# Altium footprint library Raspberry_PI_Pico.PcbLib: 3 footprints
Each footprint in its own frame and in the unit in brackets; x right, y up, seen from the top. Pads: shape width x height; smd on the part's side, far side on the other; paste and mask are expansions set on the pad; w line width, h text height; cw(c..) or ccw(c..) is an arc to the next point about the centre after c.
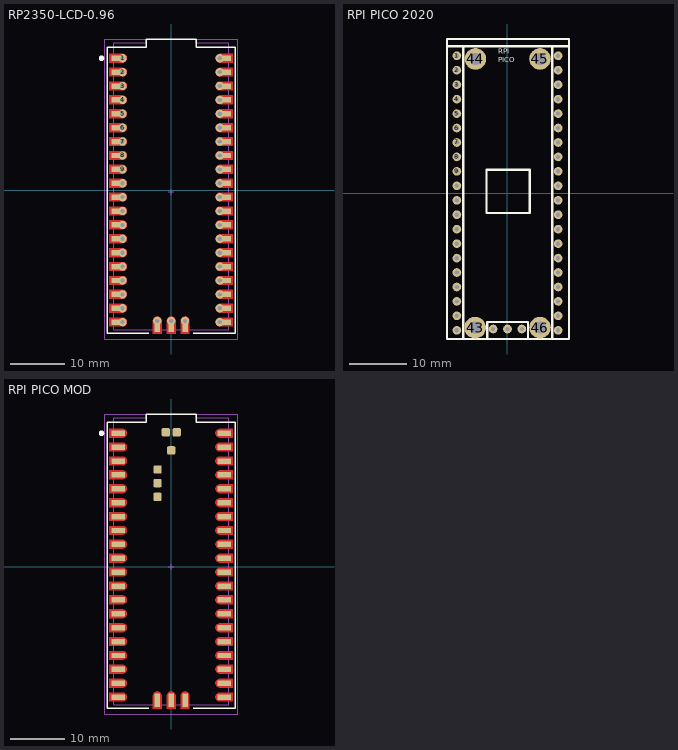
[diagram p0: the footprints below, top view; thin cyan lines are the x and y axes]

## RP2350-LCD-0.96 [mm] "Waveshare RP2350-LCD-0.96"
height 1
pads (86):
  rect 2.5x1 smd mask+0.102: 1(-9.69,24.13) 2(-9.69,21.59) 4(-9.69,16.51) 5(-9.69,13.97) 6(-9.69,11.43) 7(-9.69,8.89) 8(-9.69,6.35) 9(-9.69,3.81) 10(-9.69,1.27) 11(-9.69,-1.27) 12(-9.69,-3.81) 13(-9.69,-6.35) 14(-9.69,-8.89) 15(-9.69,-11.43) 16(-9.69,-13.97) 17(-9.69,-16.51) 18(-9.69,-19.05) 19(-9.69,-21.59) 20(-9.69,-24.13)
  round 1.524 hole 0.762: 1(-8.89,24.13) 2(-8.89,21.59) 3(-8.89,19.05) 4(-8.89,16.51) 5(-8.89,13.97) 6(-8.89,11.43) 7(-8.89,8.89) 8(-8.89,6.35) 9(-8.89,3.81) 10(-8.89,1.27) 11(-8.89,-1.27) 12(-8.89,-3.81) 13(-8.89,-6.35) 14(-8.89,-8.89) 15(-8.89,-11.43) 16(-8.89,-13.97) 17(-8.89,-16.51) 18(-8.89,-19.05) 19(-8.89,-21.59) 20(-8.89,-24.13) 21(8.89,-24.13) 22(8.89,-21.59) 23(8.89,-19.05) 24(8.89,-16.51) 25(8.89,-13.97) 26(8.89,-11.43) 27(8.89,-8.89) 28(8.89,-6.35) 29(8.89,-3.81) 30(8.89,-1.27) 31(8.89,1.27) 32(8.89,3.81) 33(8.89,6.35) 34(8.89,8.89) 35(8.89,11.43) 36(8.89,13.97) 37(8.89,16.51) 38(8.89,19.05) 39(8.89,21.59) 40(8.89,24.13) 41(-2.54,-23.9) 42(0,-23.9) 43(2.54,-23.9)
  rrect25% 2.5x1 smd mask+0.102: 3(-9.69,19.05)
  rect 2.5x1 smd: 21(9.69,-24.13) 22(9.69,-21.59) 23(9.69,-19.05) 24(9.69,-16.51) 25(9.69,-13.97) 26(9.69,-11.43) 27(9.69,-8.89) 28(9.69,-6.35) 29(9.69,-3.81) 30(9.69,-1.27) 31(9.69,1.27) 32(9.69,3.81) 33(9.69,6.35) 34(9.69,8.89) 35(9.69,11.43) 36(9.69,13.97) 37(9.69,16.51) 38(9.69,19.05) 39(9.69,21.59) 40(9.69,24.13)
  rect 1x2.5 smd: 41(-2.54,-24.7) 42(0,-24.7) 43(2.54,-24.7)
Top Layer:
  region: -1.74,-26.284 -3.34,-26.284 -3.34,-23.884 -3.34,-23.779 -3.285,-23.575 -3.18,-23.393 -3.031,-23.244 -2.849,-23.139 -2.645,-23.084 -2.435,-23.084 -2.231,-23.139 -2.049,-23.244 -1.9,-23.393 -1.795,-23.575 -1.74,-23.779 -1.74,-23.884
  region: 0.8,-26.284 -0.8,-26.284 -0.8,-23.884 -0.8,-23.779 -0.745,-23.575 -0.64,-23.393 -0.491,-23.244 -0.309,-23.139 -0.105,-23.084 0.105,-23.084 0.309,-23.139 0.491,-23.244 0.64,-23.393 0.745,-23.575 0.8,-23.779 0.8,-23.884
  region: 3.34,-26.284 1.74,-26.284 1.74,-23.884 1.74,-23.779 1.795,-23.575 1.9,-23.393 2.049,-23.244 2.231,-23.139 2.435,-23.084 2.645,-23.084 2.849,-23.139 3.031,-23.244 3.18,-23.393 3.285,-23.575 3.34,-23.779 3.34,-23.884
  region: -11.292,-24.914 -11.292,-23.314 -8.892,-23.314 -8.787,-23.314 -8.583,-23.369 -8.401,-23.474 -8.252,-23.623 -8.147,-23.805 -8.092,-24.009 -8.092,-24.219 -8.147,-24.423 -8.252,-24.605 -8.401,-24.754 -8.583,-24.859 -8.787,-24.914 -8.892,-24.914
  region: -11.292,-22.374 -11.292,-20.774 -8.892,-20.774 -8.787,-20.774 -8.583,-20.829 -8.401,-20.934 -8.252,-21.083 -8.147,-21.265 -8.092,-21.469 -8.092,-21.679 -8.147,-21.883 -8.252,-22.065 -8.401,-22.214 -8.583,-22.319 -8.787,-22.374 -8.892,-22.374
  region: -11.292,-19.834 -11.292,-18.234 -8.892,-18.234 -8.787,-18.234 -8.583,-18.289 -8.401,-18.394 -8.252,-18.543 -8.147,-18.725 -8.092,-18.929 -8.092,-19.139 -8.147,-19.343 -8.252,-19.525 -8.401,-19.674 -8.583,-19.779 -8.787,-19.834 -8.892,-19.834
  region: -11.292,-17.294 -11.292,-15.694 -8.892,-15.694 -8.787,-15.694 -8.583,-15.749 -8.401,-15.854 -8.252,-16.003 -8.147,-16.185 -8.092,-16.389 -8.092,-16.599 -8.147,-16.803 -8.252,-16.985 -8.401,-17.134 -8.583,-17.239 -8.787,-17.294 -8.892,-17.294
  region: -11.292,-14.754 -11.292,-13.154 -8.892,-13.154 -8.787,-13.154 -8.583,-13.209 -8.401,-13.314 -8.252,-13.463 -8.147,-13.645 -8.092,-13.849 -8.092,-14.059 -8.147,-14.263 -8.252,-14.445 -8.401,-14.594 -8.583,-14.699 -8.787,-14.754 -8.892,-14.754
  region: -11.292,-12.214 -11.292,-10.614 -8.892,-10.614 -8.787,-10.614 -8.583,-10.669 -8.401,-10.774 -8.252,-10.923 -8.147,-11.105 -8.092,-11.309 -8.092,-11.519 -8.147,-11.723 -8.252,-11.905 -8.401,-12.054 -8.583,-12.159 -8.787,-12.214 -8.892,-12.214
  region: -11.292,-9.674 -11.292,-8.074 -8.892,-8.074 -8.787,-8.074 -8.583,-8.129 -8.401,-8.234 -8.252,-8.383 -8.147,-8.565 -8.092,-8.769 -8.092,-8.979 -8.147,-9.183 -8.252,-9.365 -8.401,-9.514 -8.583,-9.619 -8.787,-9.674 -8.892,-9.674
  region: -11.292,-7.134 -11.292,-5.534 -8.892,-5.534 -8.787,-5.534 -8.583,-5.589 -8.401,-5.694 -8.252,-5.843 -8.147,-6.025 -8.092,-6.229 -8.092,-6.439 -8.147,-6.643 -8.252,-6.825 -8.401,-6.974 -8.583,-7.079 -8.787,-7.134 -8.892,-7.134
  region: -11.292,-4.594 -11.292,-2.994 -8.892,-2.994 -8.787,-2.994 -8.583,-3.049 -8.401,-3.154 -8.252,-3.303 -8.147,-3.485 -8.092,-3.689 -8.092,-3.899 -8.147,-4.103 -8.252,-4.285 -8.401,-4.434 -8.583,-4.539 -8.787,-4.594 -8.892,-4.594
  region: -11.292,-2.054 -11.292,-0.454 -8.892,-0.454 -8.787,-0.454 -8.583,-0.509 -8.401,-0.614 -8.252,-0.763 -8.147,-0.945 -8.092,-1.149 -8.092,-1.359 -8.147,-1.563 -8.252,-1.745 -8.401,-1.894 -8.583,-1.999 -8.787,-2.054 -8.892,-2.054
  region: -11.292,0.486 -11.292,2.086 -8.892,2.086 -8.787,2.086 -8.583,2.031 -8.401,1.926 -8.252,1.777 -8.147,1.595 -8.092,1.391 -8.092,1.181 -8.147,0.977 -8.252,0.795 -8.401,0.646 -8.583,0.541 -8.787,0.486 -8.892,0.486
  region: -11.292,3.026 -11.292,4.626 -8.892,4.626 -8.787,4.626 -8.583,4.571 -8.401,4.466 -8.252,4.317 -8.147,4.135 -8.092,3.931 -8.092,3.721 -8.147,3.517 -8.252,3.335 -8.401,3.186 -8.583,3.081 -8.787,3.026 -8.892,3.026
  region: -11.292,5.566 -11.292,7.166 -8.892,7.166 -8.787,7.166 -8.583,7.111 -8.401,7.006 -8.252,6.857 -8.147,6.675 -8.092,6.471 -8.092,6.261 -8.147,6.057 -8.252,5.875 -8.401,5.726 -8.583,5.621 -8.787,5.566 -8.892,5.566
  region: -11.292,8.106 -11.292,9.706 -8.892,9.706 -8.787,9.706 -8.583,9.651 -8.401,9.546 -8.252,9.397 -8.147,9.215 -8.092,9.011 -8.092,8.801 -8.147,8.597 -8.252,8.415 -8.401,8.266 -8.583,8.161 -8.787,8.106 -8.892,8.106
  region: -11.292,10.646 -11.292,12.246 -8.892,12.246 -8.787,12.246 -8.583,12.191 -8.401,12.086 -8.252,11.937 -8.147,11.755 -8.092,11.551 -8.092,11.341 -8.147,11.137 -8.252,10.955 -8.401,10.806 -8.583,10.701 -8.787,10.646 -8.892,10.646
  region: -11.292,13.186 -11.292,14.786 -8.892,14.786 -8.787,14.786 -8.583,14.731 -8.401,14.626 -8.252,14.477 -8.147,14.295 -8.092,14.091 -8.092,13.881 -8.147,13.677 -8.252,13.495 -8.401,13.346 -8.583,13.241 -8.787,13.186 -8.892,13.186
  region: -11.292,15.726 -11.292,17.326 -8.892,17.326 -8.787,17.326 -8.583,17.271 -8.401,17.166 -8.252,17.017 -8.147,16.835 -8.092,16.631 -8.092,16.421 -8.147,16.217 -8.252,16.035 -8.401,15.886 -8.583,15.781 -8.787,15.726 -8.892,15.726
  region: -11.292,18.266 -11.292,19.866 -8.892,19.866 -8.787,19.866 -8.583,19.811 -8.401,19.706 -8.252,19.557 -8.147,19.375 -8.092,19.171 -8.092,18.961 -8.147,18.757 -8.252,18.575 -8.401,18.426 -8.583,18.321 -8.787,18.266 -8.892,18.266
  region: -11.292,20.806 -11.292,22.406 -8.892,22.406 -8.787,22.406 -8.583,22.351 -8.401,22.246 -8.252,22.097 -8.147,21.915 -8.092,21.711 -8.092,21.501 -8.147,21.297 -8.252,21.115 -8.401,20.966 -8.583,20.861 -8.787,20.806 -8.892,20.806
  region: -11.292,23.346 -11.292,24.946 -8.892,24.946 -8.787,24.946 -8.583,24.891 -8.401,24.786 -8.252,24.637 -8.147,24.455 -8.092,24.251 -8.092,24.041 -8.147,23.837 -8.252,23.655 -8.401,23.506 -8.583,23.401 -8.787,23.346 -8.892,23.346
  region: 11.292,23.346 11.292,24.946 8.892,24.946 8.787,24.946 8.583,24.891 8.401,24.786 8.252,24.637 8.147,24.455 8.092,24.251 8.092,24.041 8.147,23.837 8.252,23.655 8.401,23.506 8.583,23.401 8.787,23.346 8.892,23.346
  region: 11.292,20.806 11.292,22.406 8.892,22.406 8.787,22.406 8.583,22.351 8.401,22.246 8.252,22.097 8.147,21.915 8.092,21.711 8.092,21.501 8.147,21.297 8.252,21.115 8.401,20.966 8.583,20.861 8.787,20.806 8.892,20.806
  region: 11.292,18.266 11.292,19.866 8.892,19.866 8.787,19.866 8.583,19.811 8.401,19.706 8.252,19.557 8.147,19.375 8.092,19.171 8.092,18.961 8.147,18.757 8.252,18.575 8.401,18.426 8.583,18.321 8.787,18.266 8.892,18.266
  region: 11.292,15.726 11.292,17.326 8.892,17.326 8.787,17.326 8.583,17.271 8.401,17.166 8.252,17.017 8.147,16.835 8.092,16.631 8.092,16.421 8.147,16.217 8.252,16.035 8.401,15.886 8.583,15.781 8.787,15.726 8.892,15.726
  region: 11.292,13.186 11.292,14.786 8.892,14.786 8.787,14.786 8.583,14.731 8.401,14.626 8.252,14.477 8.147,14.295 8.092,14.091 8.092,13.881 8.147,13.677 8.252,13.495 8.401,13.346 8.583,13.241 8.787,13.186 8.892,13.186
  region: 11.292,10.646 11.292,12.246 8.892,12.246 8.787,12.246 8.583,12.191 8.401,12.086 8.252,11.937 8.147,11.755 8.092,11.551 8.092,11.341 8.147,11.137 8.252,10.955 8.401,10.806 8.583,10.701 8.787,10.646 8.892,10.646
  region: 11.292,8.106 11.292,9.706 8.892,9.706 8.787,9.706 8.583,9.651 8.401,9.546 8.252,9.397 8.147,9.215 8.092,9.011 8.092,8.801 8.147,8.597 8.252,8.415 8.401,8.266 8.583,8.161 8.787,8.106 8.892,8.106
  region: 11.292,5.566 11.292,7.166 8.892,7.166 8.787,7.166 8.583,7.111 8.401,7.006 8.252,6.857 8.147,6.675 8.092,6.471 8.092,6.261 8.147,6.057 8.252,5.875 8.401,5.726 8.583,5.621 8.787,5.566 8.892,5.566
  region: 11.292,3.026 11.292,4.626 8.892,4.626 8.787,4.626 8.583,4.571 8.401,4.466 8.252,4.317 8.147,4.135 8.092,3.931 8.092,3.721 8.147,3.517 8.252,3.335 8.401,3.186 8.583,3.081 8.787,3.026 8.892,3.026
  region: 11.292,0.486 11.292,2.086 8.892,2.086 8.787,2.086 8.583,2.031 8.401,1.926 8.252,1.777 8.147,1.595 8.092,1.391 8.092,1.181 8.147,0.977 8.252,0.795 8.401,0.646 8.583,0.541 8.787,0.486 8.892,0.486
  region: 11.292,-2.054 11.292,-0.454 8.892,-0.454 8.787,-0.454 8.583,-0.509 8.401,-0.614 8.252,-0.763 8.147,-0.945 8.092,-1.149 8.092,-1.359 8.147,-1.563 8.252,-1.745 8.401,-1.894 8.583,-1.999 8.787,-2.054 8.892,-2.054
  region: 11.292,-4.594 11.292,-2.994 8.892,-2.994 8.787,-2.994 8.583,-3.049 8.401,-3.154 8.252,-3.303 8.147,-3.485 8.092,-3.689 8.092,-3.899 8.147,-4.103 8.252,-4.285 8.401,-4.434 8.583,-4.539 8.787,-4.594 8.892,-4.594
  region: 11.292,-7.134 11.292,-5.534 8.892,-5.534 8.787,-5.534 8.583,-5.589 8.401,-5.694 8.252,-5.843 8.147,-6.025 8.092,-6.229 8.092,-6.439 8.147,-6.643 8.252,-6.825 8.401,-6.974 8.583,-7.079 8.787,-7.134 8.892,-7.134
  region: 11.292,-9.674 11.292,-8.074 8.892,-8.074 8.787,-8.074 8.583,-8.129 8.401,-8.234 8.252,-8.383 8.147,-8.565 8.092,-8.769 8.092,-8.979 8.147,-9.183 8.252,-9.365 8.401,-9.514 8.583,-9.619 8.787,-9.674 8.892,-9.674
  region: 11.292,-12.214 11.292,-10.614 8.892,-10.614 8.787,-10.614 8.583,-10.669 8.401,-10.774 8.252,-10.923 8.147,-11.105 8.092,-11.309 8.092,-11.519 8.147,-11.723 8.252,-11.905 8.401,-12.054 8.583,-12.159 8.787,-12.214 8.892,-12.214
  region: 11.292,-14.754 11.292,-13.154 8.892,-13.154 8.787,-13.154 8.583,-13.209 8.401,-13.314 8.252,-13.463 8.147,-13.645 8.092,-13.849 8.092,-14.059 8.147,-14.263 8.252,-14.445 8.401,-14.594 8.583,-14.699 8.787,-14.754 8.892,-14.754
  region: 11.292,-17.294 11.292,-15.694 8.892,-15.694 8.787,-15.694 8.583,-15.749 8.401,-15.854 8.252,-16.003 8.147,-16.185 8.092,-16.389 8.092,-16.599 8.147,-16.803 8.252,-16.985 8.401,-17.134 8.583,-17.239 8.787,-17.294 8.892,-17.294
  region: 11.292,-19.834 11.292,-18.234 8.892,-18.234 8.787,-18.234 8.583,-18.289 8.401,-18.394 8.252,-18.543 8.147,-18.725 8.092,-18.929 8.092,-19.139 8.147,-19.343 8.252,-19.525 8.401,-19.674 8.583,-19.779 8.787,-19.834 8.892,-19.834
  region: 11.292,-22.374 11.292,-20.774 8.892,-20.774 8.787,-20.774 8.583,-20.829 8.401,-20.934 8.252,-21.083 8.147,-21.265 8.092,-21.469 8.092,-21.679 8.147,-21.883 8.252,-22.065 8.401,-22.214 8.583,-22.319 8.787,-22.374 8.892,-22.374
  region: 11.292,-24.914 11.292,-23.314 8.892,-23.314 8.787,-23.314 8.583,-23.369 8.401,-23.474 8.252,-23.623 8.147,-23.805 8.092,-24.009 8.092,-24.219 8.147,-24.423 8.252,-24.605 8.401,-24.754 8.583,-24.859 8.787,-24.914 8.892,-24.914
  lines w0.254: -10.16,1.074 -9.886,1.074 -9.69,1.27
Top Overlay:
  circle w0.508: c-12.738,24.13 r0.254
  lines w0.254: -4.102,-26.162 -11.684,-26.162 -11.684,26.131 -4.572,26.131 -4.572,27.655 4.572,27.655 4.572,26.131 11.684,26.131 11.684,-26.162 4.026,-26.162
Mechanical 13:
  lines w0.1: -10.49,-25.493 -10.49,26.933 -4.572,26.933 -4.572,27.655 -3.048,27.655 4.572,27.655 4.572,26.933 10.51,26.933 10.51,-25.493 -10.49,-25.493
Mechanical 15:
  lines w0.05: -0.5,-0.285 0.5,-0.285 ; 0,-0.785 0,0.215 ; -12.192,-27.209 -12.192,27.655 12.192,27.655 12.192,-27.209 -12.192,-27.209
3D body "RP2350_LCD_0.96_STEP.step": height 6.2, standoff 0.94, extent -10.499,-25.493 10.518,26.926
3D body "TSW-120-23-G-S-LL.stp": height 8.38, standoff -2.92, extent -10.16,-25.527 -7.62,25.4
3D body "TSW-120-23-G-S-LL.stp": height 8.38, standoff -2.92, extent 7.62,-25.527 10.16,25.4

## RPI PICO 2020 [mil]
pads (47):
  round 60 hole 30: 1(-350,950) 2(-350,850) 3(-350,750) 4(-350,650) 5(-350,550) 6(-350,450) 7(-350,350) 8(-350,250) 9(-350,150) 10(-350,50) 11(-350,-50) 12(-350,-150) 13(-350,-250) 14(-350,-350) 15(-350,-450) 16(-350,-550) 17(-350,-650) 18(-350,-750) 19(-350,-850) 20(-350,-950) 21(350,-950) 22(350,-850) 23(350,-750) 24(350,-650) 25(350,-550) 26(350,-450) 27(350,-350) 28(350,-250) 29(350,-150) 30(350,-50) 31(350,50) 32(350,150) 33(350,250) 34(350,350) 35(350,450) 36(350,550) 37(350,650) 38(350,750) 39(350,850) 40(350,950) 41(-100,-940.94) 42(0,-940.94) 43(100,-940.94)
  round 149.61 hole 82.68 mask+4: 43(-224,-931.26) 44(-222,928) 46(224.82,-931)
  round 149.61 hole 82.68: 45(224.82,928)
Top Overlay:
  lines w16: -416,1016.06 -130,1016.06 421,1016.06 cw(c421,1012.06) 425,1012.06 ; -306,-1007.26 -306,1012.06 ; -141,-1008.94 -141,-891.94 142,-891.94 142,-1009.94 ; 309,-1009.26 309,1014.06 ; -419,-1009.94 -419,1050 -419,1066.06 426,1066.06 426,1050 426,-1009.94 -419,-1009.94 ; -145,-137.94 -145,162.06 155,162.06 155,-137.94 -145,-137.94
  text "RPI / PICO" at -65.69,889.74 h60
Mechanical 1:
  text "PCB EDGE FOR USB" at -170.07,1029.74 h30
3D body "RASPBERRY PI PICO.STEP": height 246.85, standoff 100, extent -413.38,-1003.93 413.39,1055.12
3D body "TSW-120-23-G-S-LL.stp": height 330, standoff -115, extent 300,-1004.99 400,1000.01
3D body "TSW-120-23-G-S-LL.stp": height 330, standoff -115, extent -400,-1004.99 -300,1000.01

## RPI PICO MOD [mm] "RASPBERRY PI PICO RP2040 BOARD"
height 1
pads (49):
  rect 2.5x1 smd mask+0.102: 1(-9.69,24.415) 2(-9.69,21.875) 4(-9.69,16.795) 5(-9.69,14.255) 6(-9.69,11.715) 7(-9.69,9.175) 8(-9.69,6.635) 9(-9.69,4.095) 10(-9.69,1.555) 11(-9.69,-0.985) 12(-9.69,-3.525) 13(-9.69,-6.065) 14(-9.69,-8.605) 15(-9.69,-11.145) 16(-9.69,-13.685) 17(-9.69,-16.225) 18(-9.69,-18.765) 19(-9.69,-21.305) 20(-9.69,-23.845)
  rrect25% 2.5x1 smd mask+0.102: 3(-9.69,19.335)
  rect 2.5x1 smd: 21(9.69,-23.845) 22(9.69,-21.305) 23(9.69,-18.765) 24(9.69,-16.225) 25(9.69,-13.685) 26(9.69,-11.145) 27(9.69,-8.605) 28(9.69,-6.065) 29(9.69,-3.525) 30(9.69,-0.985) 31(9.69,1.555) 32(9.69,4.095) 33(9.69,6.635) 34(9.69,9.175) 35(9.69,11.715) 36(9.69,14.255) 37(9.69,16.795) 38(9.69,19.335) 39(9.69,21.875) 40(9.69,24.415)
  rect 1x2.5 smd: 41(-2.54,-24.415) 42(0,-24.415) 43(2.54,-24.415)
  rrect30% 1.5x1.5 smd: 44(0.01,21.292) 45(1.01,24.592) 46(-0.99,24.592) 47(-2.49,17.792) 48(-2.49,15.292) 49(-2.49,12.792)
Top Layer:
  region: -1.74,-25.999 -3.34,-25.999 -3.34,-23.599 -3.34,-23.494 -3.285,-23.29 -3.18,-23.108 -3.031,-22.959 -2.849,-22.854 -2.645,-22.799 -2.435,-22.799 -2.231,-22.854 -2.049,-22.959 -1.9,-23.108 -1.795,-23.29 -1.74,-23.494 -1.74,-23.599
  region: 0.8,-25.999 -0.8,-25.999 -0.8,-23.599 -0.8,-23.494 -0.745,-23.29 -0.64,-23.108 -0.491,-22.959 -0.309,-22.854 -0.105,-22.799 0.105,-22.799 0.309,-22.854 0.491,-22.959 0.64,-23.108 0.745,-23.29 0.8,-23.494 0.8,-23.599
  region: 3.34,-25.999 1.74,-25.999 1.74,-23.599 1.74,-23.494 1.795,-23.29 1.9,-23.108 2.049,-22.959 2.231,-22.854 2.435,-22.799 2.645,-22.799 2.849,-22.854 3.031,-22.959 3.18,-23.108 3.285,-23.29 3.34,-23.494 3.34,-23.599
  region: -11.292,-24.629 -11.292,-23.029 -8.892,-23.029 -8.787,-23.029 -8.583,-23.084 -8.401,-23.189 -8.252,-23.338 -8.147,-23.52 -8.092,-23.724 -8.092,-23.934 -8.147,-24.138 -8.252,-24.32 -8.401,-24.469 -8.583,-24.574 -8.787,-24.629 -8.892,-24.629
  region: -11.292,-22.089 -11.292,-20.489 -8.892,-20.489 -8.787,-20.489 -8.583,-20.544 -8.401,-20.649 -8.252,-20.798 -8.147,-20.98 -8.092,-21.184 -8.092,-21.394 -8.147,-21.598 -8.252,-21.78 -8.401,-21.929 -8.583,-22.034 -8.787,-22.089 -8.892,-22.089
  region: -11.292,-19.549 -11.292,-17.949 -8.892,-17.949 -8.787,-17.949 -8.583,-18.004 -8.401,-18.109 -8.252,-18.258 -8.147,-18.44 -8.092,-18.644 -8.092,-18.854 -8.147,-19.058 -8.252,-19.24 -8.401,-19.389 -8.583,-19.494 -8.787,-19.549 -8.892,-19.549
  region: -11.292,-17.009 -11.292,-15.409 -8.892,-15.409 -8.787,-15.409 -8.583,-15.464 -8.401,-15.569 -8.252,-15.718 -8.147,-15.9 -8.092,-16.104 -8.092,-16.314 -8.147,-16.518 -8.252,-16.7 -8.401,-16.849 -8.583,-16.954 -8.787,-17.009 -8.892,-17.009
  region: -11.292,-14.469 -11.292,-12.869 -8.892,-12.869 -8.787,-12.869 -8.583,-12.924 -8.401,-13.029 -8.252,-13.178 -8.147,-13.36 -8.092,-13.564 -8.092,-13.774 -8.147,-13.978 -8.252,-14.16 -8.401,-14.309 -8.583,-14.414 -8.787,-14.469 -8.892,-14.469
  region: -11.292,-11.929 -11.292,-10.329 -8.892,-10.329 -8.787,-10.329 -8.583,-10.384 -8.401,-10.489 -8.252,-10.638 -8.147,-10.82 -8.092,-11.024 -8.092,-11.234 -8.147,-11.438 -8.252,-11.62 -8.401,-11.769 -8.583,-11.874 -8.787,-11.929 -8.892,-11.929
  region: -11.292,-9.389 -11.292,-7.789 -8.892,-7.789 -8.787,-7.789 -8.583,-7.844 -8.401,-7.949 -8.252,-8.098 -8.147,-8.28 -8.092,-8.484 -8.092,-8.694 -8.147,-8.898 -8.252,-9.08 -8.401,-9.229 -8.583,-9.334 -8.787,-9.389 -8.892,-9.389
  region: -11.292,-6.849 -11.292,-5.249 -8.892,-5.249 -8.787,-5.249 -8.583,-5.304 -8.401,-5.409 -8.252,-5.558 -8.147,-5.74 -8.092,-5.944 -8.092,-6.154 -8.147,-6.358 -8.252,-6.54 -8.401,-6.689 -8.583,-6.794 -8.787,-6.849 -8.892,-6.849
  region: -11.292,-4.309 -11.292,-2.709 -8.892,-2.709 -8.787,-2.709 -8.583,-2.764 -8.401,-2.869 -8.252,-3.018 -8.147,-3.2 -8.092,-3.404 -8.092,-3.614 -8.147,-3.818 -8.252,-4 -8.401,-4.149 -8.583,-4.254 -8.787,-4.309 -8.892,-4.309
  region: -11.292,-1.769 -11.292,-0.169 -8.892,-0.169 -8.787,-0.169 -8.583,-0.224 -8.401,-0.329 -8.252,-0.478 -8.147,-0.66 -8.092,-0.864 -8.092,-1.074 -8.147,-1.278 -8.252,-1.46 -8.401,-1.609 -8.583,-1.714 -8.787,-1.769 -8.892,-1.769
  region: -11.292,0.771 -11.292,2.371 -8.892,2.371 -8.787,2.371 -8.583,2.316 -8.401,2.211 -8.252,2.062 -8.147,1.88 -8.092,1.676 -8.092,1.466 -8.147,1.262 -8.252,1.08 -8.401,0.931 -8.583,0.826 -8.787,0.771 -8.892,0.771
  region: -11.292,3.311 -11.292,4.911 -8.892,4.911 -8.787,4.911 -8.583,4.856 -8.401,4.751 -8.252,4.602 -8.147,4.42 -8.092,4.216 -8.092,4.006 -8.147,3.802 -8.252,3.62 -8.401,3.471 -8.583,3.366 -8.787,3.311 -8.892,3.311
  region: -11.292,5.851 -11.292,7.451 -8.892,7.451 -8.787,7.451 -8.583,7.396 -8.401,7.291 -8.252,7.142 -8.147,6.96 -8.092,6.756 -8.092,6.546 -8.147,6.342 -8.252,6.16 -8.401,6.011 -8.583,5.906 -8.787,5.851 -8.892,5.851
  region: -11.292,8.391 -11.292,9.991 -8.892,9.991 -8.787,9.991 -8.583,9.936 -8.401,9.831 -8.252,9.682 -8.147,9.5 -8.092,9.296 -8.092,9.086 -8.147,8.882 -8.252,8.7 -8.401,8.551 -8.583,8.446 -8.787,8.391 -8.892,8.391
  region: -11.292,10.931 -11.292,12.531 -8.892,12.531 -8.787,12.531 -8.583,12.476 -8.401,12.371 -8.252,12.222 -8.147,12.04 -8.092,11.836 -8.092,11.626 -8.147,11.422 -8.252,11.24 -8.401,11.091 -8.583,10.986 -8.787,10.931 -8.892,10.931
  region: -11.292,13.471 -11.292,15.071 -8.892,15.071 -8.787,15.071 -8.583,15.016 -8.401,14.911 -8.252,14.762 -8.147,14.58 -8.092,14.376 -8.092,14.166 -8.147,13.962 -8.252,13.78 -8.401,13.631 -8.583,13.526 -8.787,13.471 -8.892,13.471
  region: -11.292,16.011 -11.292,17.611 -8.892,17.611 -8.787,17.611 -8.583,17.556 -8.401,17.451 -8.252,17.302 -8.147,17.12 -8.092,16.916 -8.092,16.706 -8.147,16.502 -8.252,16.32 -8.401,16.171 -8.583,16.066 -8.787,16.011 -8.892,16.011
  region: -11.292,18.551 -11.292,20.151 -8.892,20.151 -8.787,20.151 -8.583,20.096 -8.401,19.991 -8.252,19.842 -8.147,19.66 -8.092,19.456 -8.092,19.246 -8.147,19.042 -8.252,18.86 -8.401,18.711 -8.583,18.606 -8.787,18.551 -8.892,18.551
  region: -11.292,21.091 -11.292,22.691 -8.892,22.691 -8.787,22.691 -8.583,22.636 -8.401,22.531 -8.252,22.382 -8.147,22.2 -8.092,21.996 -8.092,21.786 -8.147,21.582 -8.252,21.4 -8.401,21.251 -8.583,21.146 -8.787,21.091 -8.892,21.091
  region: -11.292,23.631 -11.292,25.231 -8.892,25.231 -8.787,25.231 -8.583,25.176 -8.401,25.071 -8.252,24.922 -8.147,24.74 -8.092,24.536 -8.092,24.326 -8.147,24.122 -8.252,23.94 -8.401,23.791 -8.583,23.686 -8.787,23.631 -8.892,23.631
  region: 11.292,23.631 11.292,25.231 8.892,25.231 8.787,25.231 8.583,25.176 8.401,25.071 8.252,24.922 8.147,24.74 8.092,24.536 8.092,24.326 8.147,24.122 8.252,23.94 8.401,23.791 8.583,23.686 8.787,23.631 8.892,23.631
  region: 11.292,21.091 11.292,22.691 8.892,22.691 8.787,22.691 8.583,22.636 8.401,22.531 8.252,22.382 8.147,22.2 8.092,21.996 8.092,21.786 8.147,21.582 8.252,21.4 8.401,21.251 8.583,21.146 8.787,21.091 8.892,21.091
  region: 11.292,18.551 11.292,20.151 8.892,20.151 8.787,20.151 8.583,20.096 8.401,19.991 8.252,19.842 8.147,19.66 8.092,19.456 8.092,19.246 8.147,19.042 8.252,18.86 8.401,18.711 8.583,18.606 8.787,18.551 8.892,18.551
  region: 11.292,16.011 11.292,17.611 8.892,17.611 8.787,17.611 8.583,17.556 8.401,17.451 8.252,17.302 8.147,17.12 8.092,16.916 8.092,16.706 8.147,16.502 8.252,16.32 8.401,16.171 8.583,16.066 8.787,16.011 8.892,16.011
  region: 11.292,13.471 11.292,15.071 8.892,15.071 8.787,15.071 8.583,15.016 8.401,14.911 8.252,14.762 8.147,14.58 8.092,14.376 8.092,14.166 8.147,13.962 8.252,13.78 8.401,13.631 8.583,13.526 8.787,13.471 8.892,13.471
  region: 11.292,10.931 11.292,12.531 8.892,12.531 8.787,12.531 8.583,12.476 8.401,12.371 8.252,12.222 8.147,12.04 8.092,11.836 8.092,11.626 8.147,11.422 8.252,11.24 8.401,11.091 8.583,10.986 8.787,10.931 8.892,10.931
  region: 11.292,8.391 11.292,9.991 8.892,9.991 8.787,9.991 8.583,9.936 8.401,9.831 8.252,9.682 8.147,9.5 8.092,9.296 8.092,9.086 8.147,8.882 8.252,8.7 8.401,8.551 8.583,8.446 8.787,8.391 8.892,8.391
  region: 11.292,5.851 11.292,7.451 8.892,7.451 8.787,7.451 8.583,7.396 8.401,7.291 8.252,7.142 8.147,6.96 8.092,6.756 8.092,6.546 8.147,6.342 8.252,6.16 8.401,6.011 8.583,5.906 8.787,5.851 8.892,5.851
  region: 11.292,3.311 11.292,4.911 8.892,4.911 8.787,4.911 8.583,4.856 8.401,4.751 8.252,4.602 8.147,4.42 8.092,4.216 8.092,4.006 8.147,3.802 8.252,3.62 8.401,3.471 8.583,3.366 8.787,3.311 8.892,3.311
  region: 11.292,0.771 11.292,2.371 8.892,2.371 8.787,2.371 8.583,2.316 8.401,2.211 8.252,2.062 8.147,1.88 8.092,1.676 8.092,1.466 8.147,1.262 8.252,1.08 8.401,0.931 8.583,0.826 8.787,0.771 8.892,0.771
  region: 11.292,-1.769 11.292,-0.169 8.892,-0.169 8.787,-0.169 8.583,-0.224 8.401,-0.329 8.252,-0.478 8.147,-0.66 8.092,-0.864 8.092,-1.074 8.147,-1.278 8.252,-1.46 8.401,-1.609 8.583,-1.714 8.787,-1.769 8.892,-1.769
  region: 11.292,-4.309 11.292,-2.709 8.892,-2.709 8.787,-2.709 8.583,-2.764 8.401,-2.869 8.252,-3.018 8.147,-3.2 8.092,-3.404 8.092,-3.614 8.147,-3.818 8.252,-4 8.401,-4.149 8.583,-4.254 8.787,-4.309 8.892,-4.309
  region: 11.292,-6.849 11.292,-5.249 8.892,-5.249 8.787,-5.249 8.583,-5.304 8.401,-5.409 8.252,-5.558 8.147,-5.74 8.092,-5.944 8.092,-6.154 8.147,-6.358 8.252,-6.54 8.401,-6.689 8.583,-6.794 8.787,-6.849 8.892,-6.849
  region: 11.292,-9.389 11.292,-7.789 8.892,-7.789 8.787,-7.789 8.583,-7.844 8.401,-7.949 8.252,-8.098 8.147,-8.28 8.092,-8.484 8.092,-8.694 8.147,-8.898 8.252,-9.08 8.401,-9.229 8.583,-9.334 8.787,-9.389 8.892,-9.389
  region: 11.292,-11.929 11.292,-10.329 8.892,-10.329 8.787,-10.329 8.583,-10.384 8.401,-10.489 8.252,-10.638 8.147,-10.82 8.092,-11.024 8.092,-11.234 8.147,-11.438 8.252,-11.62 8.401,-11.769 8.583,-11.874 8.787,-11.929 8.892,-11.929
  region: 11.292,-14.469 11.292,-12.869 8.892,-12.869 8.787,-12.869 8.583,-12.924 8.401,-13.029 8.252,-13.178 8.147,-13.36 8.092,-13.564 8.092,-13.774 8.147,-13.978 8.252,-14.16 8.401,-14.309 8.583,-14.414 8.787,-14.469 8.892,-14.469
  region: 11.292,-17.009 11.292,-15.409 8.892,-15.409 8.787,-15.409 8.583,-15.464 8.401,-15.569 8.252,-15.718 8.147,-15.9 8.092,-16.104 8.092,-16.314 8.147,-16.518 8.252,-16.7 8.401,-16.849 8.583,-16.954 8.787,-17.009 8.892,-17.009
  region: 11.292,-19.549 11.292,-17.949 8.892,-17.949 8.787,-17.949 8.583,-18.004 8.401,-18.109 8.252,-18.258 8.147,-18.44 8.092,-18.644 8.092,-18.854 8.147,-19.058 8.252,-19.24 8.401,-19.389 8.583,-19.494 8.787,-19.549 8.892,-19.549
  region: 11.292,-22.089 11.292,-20.489 8.892,-20.489 8.787,-20.489 8.583,-20.544 8.401,-20.649 8.252,-20.798 8.147,-20.98 8.092,-21.184 8.092,-21.394 8.147,-21.598 8.252,-21.78 8.401,-21.929 8.583,-22.034 8.787,-22.089 8.892,-22.089
  region: 11.292,-24.629 11.292,-23.029 8.892,-23.029 8.787,-23.029 8.583,-23.084 8.401,-23.189 8.252,-23.338 8.147,-23.52 8.092,-23.724 8.092,-23.934 8.147,-24.138 8.252,-24.32 8.401,-24.469 8.583,-24.574 8.787,-24.629 8.892,-24.629
Top Overlay:
  circle w0.508: c-12.738,24.415 r0.254
  lines w0.254: -4.102,-25.877 -11.684,-25.877 -11.684,26.416 -4.572,26.416 -4.572,27.94 4.572,27.94 4.572,26.416 11.684,26.416 11.684,-25.877 4.026,-25.877
Mechanical 13:
  lines w0.1: -10.49,-25.208 -10.49,27.218 -4.572,27.218 -4.572,27.94 -3.048,27.94 4.572,27.94 4.572,27.218 10.51,27.218 10.51,-25.208 -10.49,-25.208
Mechanical 15:
  lines w0.05: -0.5,0 0.5,0 ; 0,-0.5 0,0.5 ; -12.192,-26.924 -12.192,27.94 12.192,27.94 12.192,-26.924 -12.192,-26.924
3D body "Raspberry Pi Pico-R3.STEP": height 3.69, standoff 0, extent -10.49,-25.208 10.51,27.218